# Altium integrated library ERJ-6GEYJ104V.IntLib: 1 symbol
Pins are listed as number, name and electrical type; pins without a type are passive.

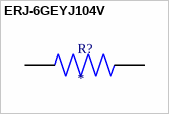
[diagram p0: symbol ERJ-6GEYJ104V]

## ERJ-6GEYJ104V
designator R?
Series/Type: Thick Film Chip Resistors, Power Rating (W): 0.125, Chip Size (LxW(EIA)) (mm): 2.0 x 1.25 (EIA:0805), Resistance Values (â„¦): 100000, Resistance Tolerance (%): 5, T.C.R (Ã—10â»â¶/K): Â±200; MP: ERJ-6GEYJ104V; MF: Panasonic Electronic; Purchase-URL: https://pricing.snapeda.com/search/part/ERJ-6GEYJ104V/?ref=eda; Value: *; SnapEDA_Link: https://www.snapeda.com/parts/ERJ-6GEYJ104V/Panasonic+Electronic+Components/view-part/?ref=snap; Price: None; Package: 805-2 Panasonic; Check_prices: https://www.snapeda.com/parts/ERJ-6GEYJ104V/Panasonic+Electronic+Components/view-part/?ref=eda; Availability: In Stock
footprint RES_ERJ-6GEYJ104V
pins: 1, 2